# Altium footprint library LSM6DSRTR.PcbLib: 1 footprints
Each footprint in its own frame and in the unit in brackets; x right, y up, seen from the top. Pads: shape width x height; smd on the part's side, far side on the other; paste and mask are expansions set on the pad; w line width, h text height; cw(c..) or ccw(c..) is an arc to the next point about the centre after c.
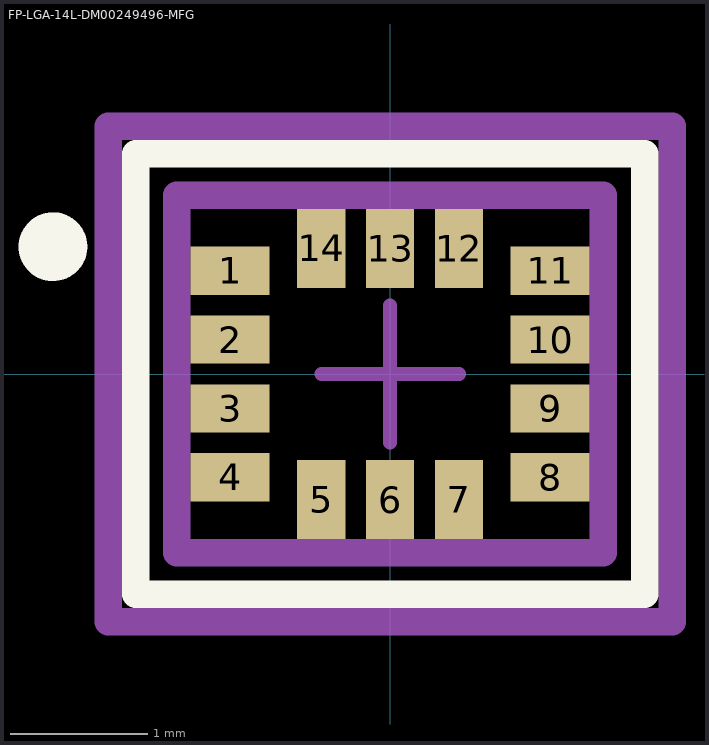
[diagram p0: the footprint, top view; thin cyan lines are the x and y axes]

## FP-LGA-14L-DM00249496-MFG [mm]
pads (14):
  rect 0.575x0.35 smd paste-1000 mask+0: 1(-1.162,0.75) 2(-1.162,0.25) 3(-1.162,-0.25) 4(-1.162,-0.75) 8(1.162,-0.75) 9(1.162,-0.25) 10(1.162,0.25) 11(1.162,0.75)
  rect 0.35x0.575 smd paste-1000 mask+0: 5(-0.5,-0.913) 6(0,-0.913) 7(0.5,-0.913) 12(0.5,0.913) 13(0,0.913) 14(-0.5,0.913)
Top Overlay:
  circle w0.25: c-2.45,0.925 r0.125
  lines w0.2: -1.85,-1.6 -1.85,1.6 1.85,1.6 1.85,-1.6 -1.85,-1.6
Top Paste:
  rectangle: -0.652,0.648 -0.348,1.177
  rectangle: -0.152,0.648 0.152,1.177
  rectangle: 0.348,0.648 0.652,1.177
  rectangle: 0.348,-1.177 0.652,-0.648
  rectangle: -0.152,-1.177 0.152,-0.648
  rectangle: -0.652,-1.177 -0.348,-0.648
  rectangle: 0.898,0.598 1.427,0.902
  rectangle: 0.898,0.098 1.427,0.402
  rectangle: 0.898,-0.402 1.427,-0.098
  rectangle: 0.898,-0.902 1.427,-0.598
  rectangle: -1.427,-0.902 -0.898,-0.598
  rectangle: -1.427,-0.402 -0.898,-0.098
  rectangle: -1.427,0.098 -0.898,0.402
  rectangle: -1.427,0.598 -0.898,0.902
Top Assembly:
  lines w0.2: -2.05,-1.8 -2.05,1.8 2.05,1.8 2.05,-1.8 -2.05,-1.8
  text ".Designator" at 0,-0.001 h1
Top 3D Body:
  lines w0.2: -1.55,-1.3 -1.55,1.3 1.55,1.3 1.55,-1.3 -1.55,-1.3
Top Courtyard:
  lines w0.2: -2.05,-1.8 -2.05,1.8 2.05,1.8 2.05,-1.8 -2.05,-1.8
Top Component Center:
  lines w0.1: -0.5,0 0.5,0 ; 0,-0.5 0,0.5
3D body "IC_STMicroelectronics_LSM6DSRTR_eec.STEP": height 0.25, standoff 0, extent -2.05,-1.8 2.05,1.8